# EAGLE library part DS04-254-2-03BK-SMT (library DS04-254-2-03BK-SMT)
3 Position, Surface Mount, 2.54 mm Pitch, Flat Slide Actuator, Flat Bottom, SMT Pin, DIP Switch Source: Datasheet <https://www.sameskydevices.com/product/resource/ds04-254-smt.pdf>
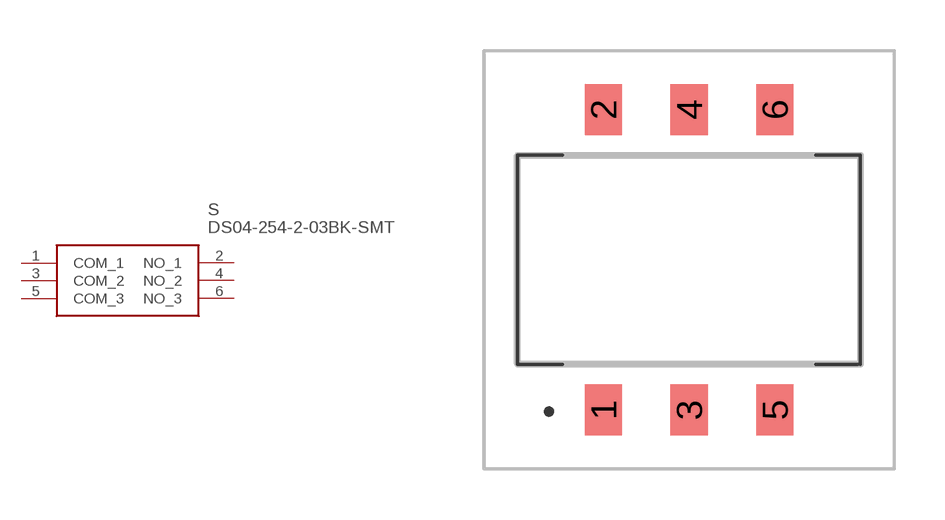
[diagram p0: symbol with the pads of DS04254203BKSMT; footprint DS04254203BKSMT]

Designator prefix S

## DS04-254-2-03BK-SMT (Description: 3 Position, Surface Mount, 2.54 mm Pitch, Flat Slide Actuator, Flat Bottom, SMT Pin, DIP Switch; Height: 4.3mm; Manufacturer_Name: Same Sky; Manufacturer_Part_Number: DS04-254-2-03BK-SMT; Mouser_Part_Number: 490-DS04254203BK-SMT; Mouser_Price-Stock: https://www.mouser.co.uk/ProductDetail/Same-Sky/DS04-254-2-03BK-SMT?qs=wnTfsH77Xs6HyisDGRVjIg%3D%3D)  [DS04254203BKSMT]
1  COM_1
2  NO_1
3  COM_2
4  NO_2
5  COM_3
6  NO_3

## Footprint DS04254203BKSMT (pad centres in mm)
DS04-254-2-03BK-SMT-3
smd 1.1 x 1.5: 1 -2.54,-4.45; 2 -2.54,4.45; 3 0,-4.45; 4 0,4.45; 5 2.54,-4.45; 6 2.54,4.45